# Altium footprint library PcbLib.PcbLib: 42 footprints (part 3 of 3)
Each footprint in its own frame and in the unit in brackets; x right, y up, seen from the top. Pads: shape width x height; smd on the part's side, far side on the other; paste and mask are expansions set on the pad; w line width, h text height; cw(c..) or ccw(c..) is an arc to the next point about the centre after c.
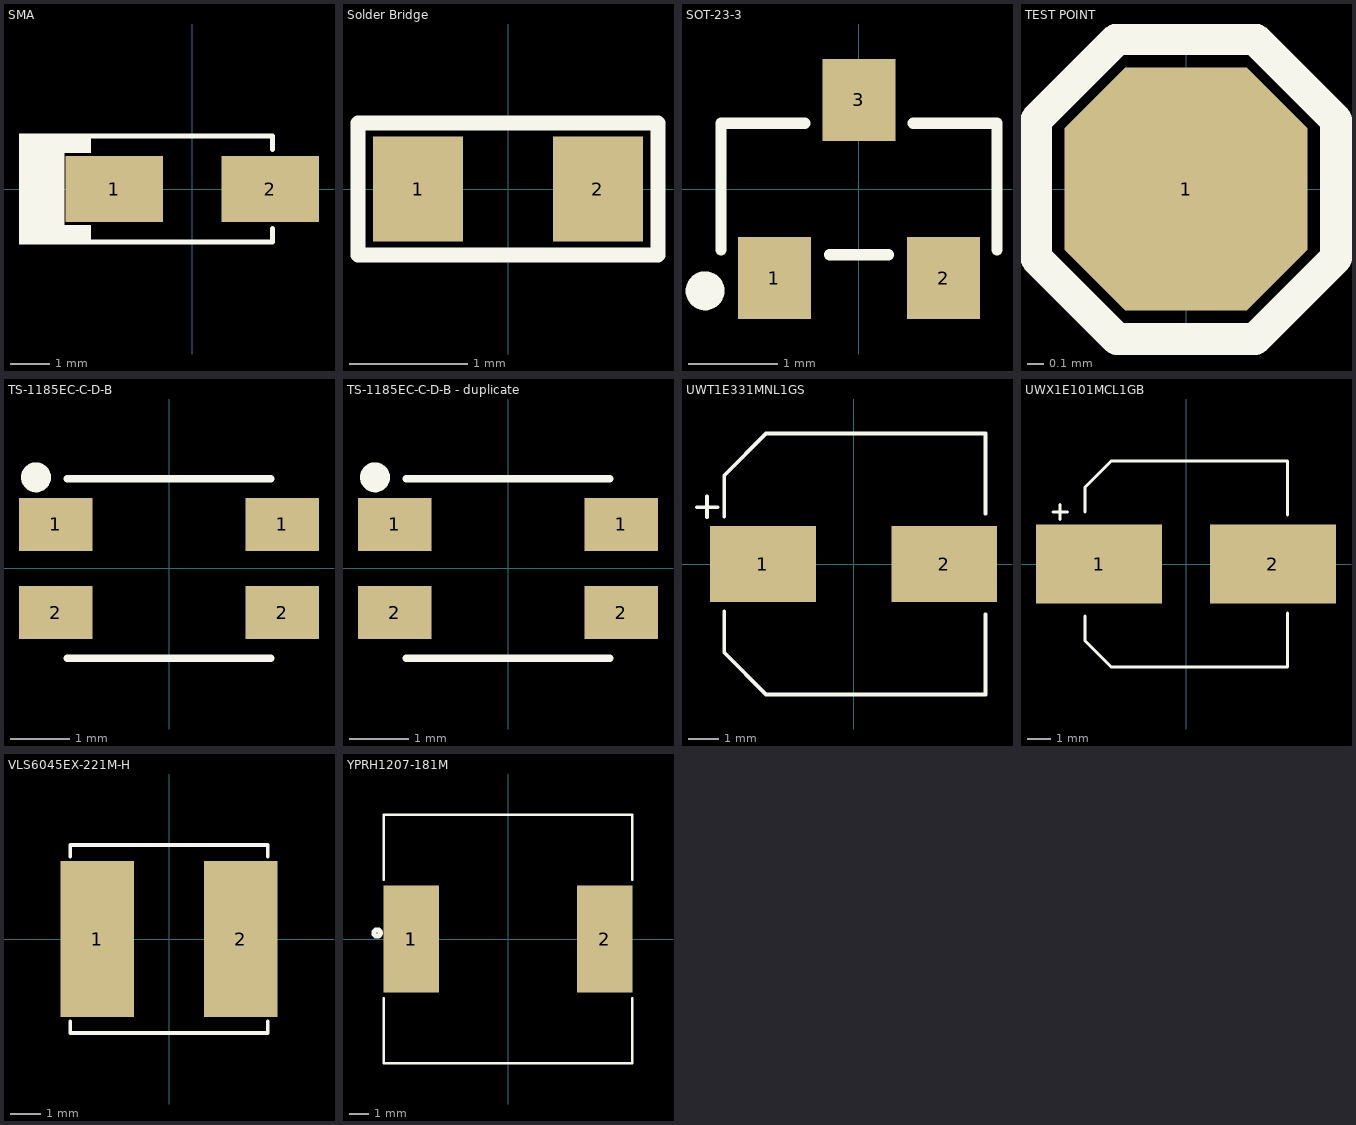
[diagram p2: the footprints below, top view; thin cyan lines are the x and y axes]

## SMA [mm]
pads (2):
  rect 2.5x1.7 smd: 1(-2,0) 2(2,0)
Top Overlay:
  rectangle: -3.3,0.924 -2.596,1.422
  rectangle: -4.445,-1.422 -3.278,1.422
  rectangle: -3.3,-1.422 -2.596,-0.924
  lines w0.127: -2.658,-1.358 2.061,-1.358 2.061,-1.012 ; -2.658,1.358 2.061,1.358 2.061,1.012
3D body "User Library-DO-214AC SMA.step": height 2.4, standoff 0, extent -2.6,-1.3 2.6,1.3

## Solder Bridge [mil] "Solder Bridge ON"
pads (2):
  rect 30x35 smd: 1(-30,0) 2(30,0)
Top Overlay:
  lines w5: -50,-22 50,-22 50,22 -50,22 -50,-22

## SOT-23-3 [mm] "TRANS NPN 40V 0.6A SOT23"
pads (3):
  rect 0.82x0.92 smd: 1(-0.95,-1) 2(0.95,-1) 3(0,1)
Top Overlay:
  circle w0.254: c-1.727,-1.143 r0.092
  lines w0.127: -1.549,-0.686 -1.549,0.737 -0.61,0.737 ; -0.33,-0.737 0.33,-0.737 ; 0.61,0.737 1.549,0.737 1.549,-0.686
3D body "CircuitWorks-SOT-23.step": height 1.1, standoff 0, extent -1.5,-1.25 1.5,1.25

## TEST POINT [mil]
pads (1):
  oct 60x60 smd: 1(0,0)
Top Overlay:
  lines w7.87: -17,-37 17,-37 ; -17,-37 -37,-17 -37,17 -17,37 ; -17,-37 17,-37 ; -17,37 17,37 ; -17,37 17,37 ; 17,-37 37,-17 37,17 17,37

## TS-1185EC-C-D-B [mm]
pads (4):
  rect 1.25x0.9 smd: 1(-1.925,0.75) 1(1.925,0.75) 2(-1.925,-0.75) 2(1.925,-0.75)
Top Overlay:
  circle w0.254: c-2.261,1.549 r0.127
  lines w0.127: -1.727,-1.524 1.727,-1.524 ; -1.727,1.524 1.727,1.524
3D body "ts-1185ec-c-d-b.stp": height 2, standoff 0, extent -2.325,-1.5 2.325,1.5

## TS-1185EC-C-D-B - duplicate [mm]
pads (4):
  rect 1.25x0.9 smd: 1(-1.925,0.75) 1(1.925,0.75) 2(-1.925,-0.75) 2(1.925,-0.75)
Top Overlay:
  circle w0.254: c-2.261,1.549 r0.127
  lines w0.127: -1.727,-1.524 1.727,-1.524 ; -1.727,1.524 1.727,1.524
3D body "ts-1185ec-c-d-b.stp": height 2, standoff 0, extent -2.325,-1.5 2.325,1.5

## UWT1E331MNL1GS [mm]
pads (2):
  rect 3.5x2.5 smd: 1(-3,0) 2(3,0)
Top Overlay:
  lines w0.127: -5.182,1.88 -4.496,1.88 ; -4.851,1.549 -4.851,2.235 ; -4.28,-1.562 -4.28,-2.934 -2.896,-4.318 4.369,-4.318 4.369,-1.676 ; -4.28,1.562 -4.28,2.934 -2.896,4.318 4.369,4.318 4.369,1.676
3D body "PCAP_8x10-ELECT_NCA.step": height 10.34, standoff 0, extent -4.648,-4.254 4.648,4.254

## UWX1E101MCL1GB [mm]
pads (2):
  rect 5.3x3.3 smd: 1(-3.65,0) 2(3.65,0)
Top Overlay:
  lines w0.127: -5.588,2.184 -4.978,2.184 ; -5.283,1.88 -5.283,2.489 ; -4.242,-2.184 -4.242,-3.226 -3.15,-4.318 4.267,-4.318 4.267,-2.057 ; -4.242,2.184 -4.242,3.226 -3.15,4.318 4.267,4.318 4.267,2.057
3D body "PCAP_8x10-ELECT_NCA.step": height 10.34, standoff 0, extent -4.648,-4.254 4.648,4.254

## VLS6045EX-221M-H [mm]
pads (2):
  rect 2.4x5.1 smd: 1(-2.35,0) 2(2.35,0)
Top Overlay:
  lines w0.127: -3.226,-2.692 -3.226,-3.073 3.226,-3.073 3.226,-2.692 ; -3.226,2.692 -3.226,3.073 3.226,3.073 3.226,2.692
3D body "vls6045ex-h.step": height 4.67, standoff 0.18, extent -3.15,-3 3.15,3

## YPRH1207-181M [mm]
pads (3):
  rect 2.8x5.4 smd: 1(-4.9,0) 1(-4.9,0) 2(4.9,0)
Top Overlay:
  circle w0.254: c-6.629,0.305 r0.163
  lines w0.127: -6.299,-2.997 -6.299,-6.299 6.299,-6.299 6.299,-2.997 ; -6.299,2.997 -6.299,6.299 6.299,6.299 6.299,2.997
3D body "srr1260-121k.stp": height 6, standoff 0, extent -6.25,-6.25 6.25,6.25